# Altium footprint library Componentes.PcbLib: 1 footprints
Each footprint in its own frame and in the unit in brackets; x right, y up, seen from the top. Pads: shape width x height; smd on the part's side, far side on the other; paste and mask are expansions set on the pad; w line width, h text height; cw(c..) or ccw(c..) is an arc to the next point about the centre after c.
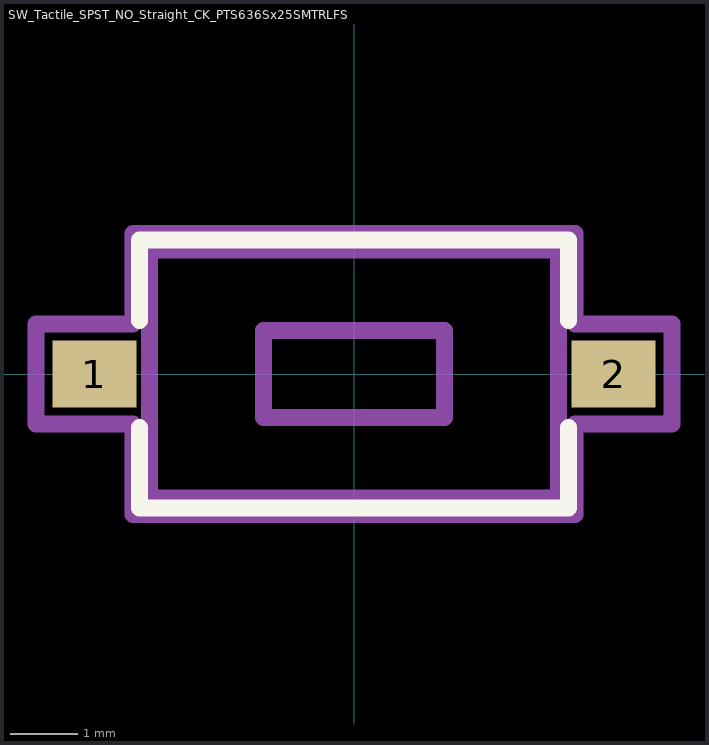
[diagram p0: the footprint, top view; thin cyan lines are the x and y axes]

## SW_Tactile_SPST_NO_Straight_CK_PTS636Sx25SMTRLFS [mm]
pads (2):
  rect 1.25x1 smd: 1(-3.875,0) 2(3.875,0)
F.SilkS:
  lines w0.254: -3.2,-0.8 -3.2,-2 3.2,-2 3.2,-0.8 ; -3.2,0.8 -3.2,2 3.2,2 3.2,0.8
Dwgs.User:
  lines w0.254: -1.35,-0.65 -1.35,0.65 1.35,0.65 1.35,-0.65 -1.35,-0.65
F.CrtYd:
  lines w0.254: -4.75,-0.75 -4.75,0.75 -3.3,0.75 -3.3,2.1 3.3,2.1 3.3,0.75 4.75,0.75 4.75,-0.75 3.3,-0.75 3.3,-2.1 -3.3,-2.1 -3.3,-0.75 -4.75,-0.75
F.Fab:
  lines w0.254: -3.05,-1.85 -3.05,1.85 3.05,1.85 3.05,-1.85 -3.05,-1.85
  text "'.Designator'" at -0.719,-0.199 h0.5